# Altium schematic symbol library SP721.SchLib: 1 symbol
Pins are listed as number, name and electrical type; pins without a type are passive.

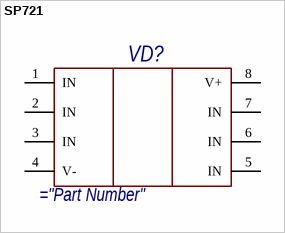
[diagram p0: symbol SP721]

## SP721
designator VD?
pins: 1 IN, 2 IN, 3 IN, 4 V-, 5 IN, 6 IN, 7 IN, 8 V+